# Altium integrated library 530470710.IntLib: 1 symbol
Pins are listed as number, name and electrical type; pins without a type are passive.

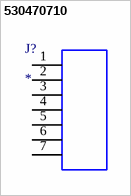
[diagram p0: symbol 530470710]

## 530470710
designator J?
Conn Shrouded Header (4 Sides) HDR 7 POS 1.25mm Solder ST Top Entry Thru-Hole PicoBladeâ„¢ Tray; MF: Molex; MP: 530470710; SnapEDA_Link: https://www.snapeda.com/parts/530470710/Molex/view-part/?ref=snap; Package: None; Value: *; Check_prices: https://www.snapeda.com/parts/530470710/Molex/view-part/?ref=eda
footprint CONN07_530470710_MOL
pins: 1, 2, 3, 4, 5, 6, 7